# Altium schematic symbol library Altium_Library.SchLib: 822 symbols (part 14 of 17)
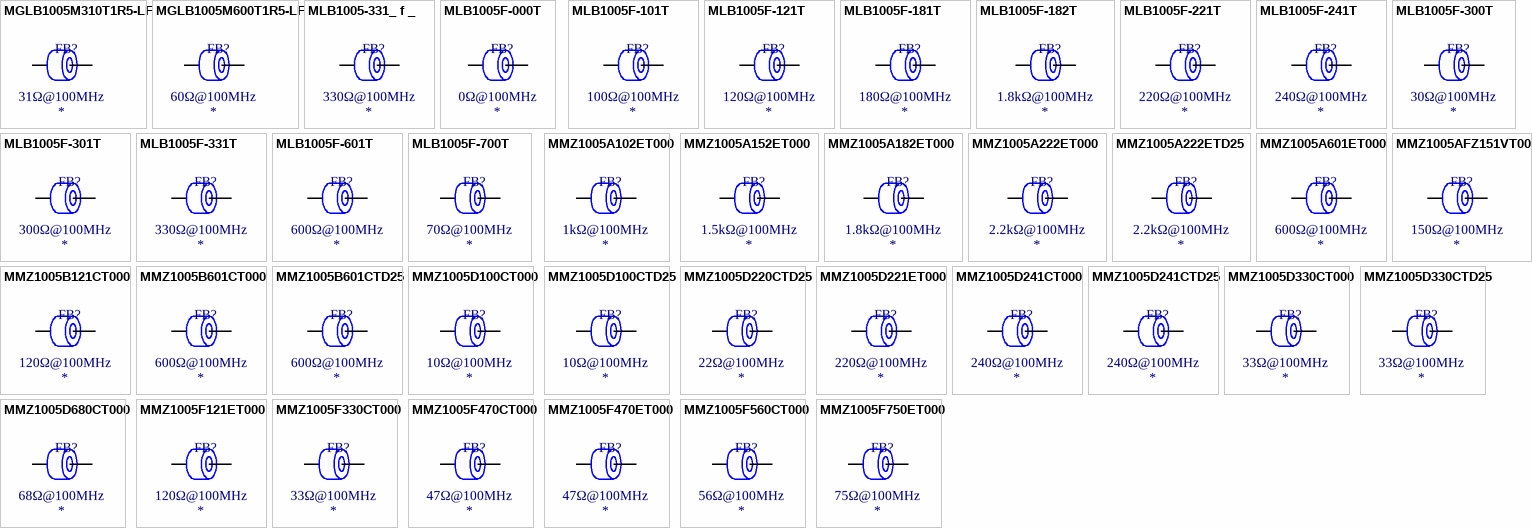
[diagram p33: symbols MGLB1005M310T1R5-LF to MMZ1005F750ET000]

## MLB1005F-181T
designator FB?  Impedance @ Frequency: 180Ω@100MHz
Ferrite, 180Ω@100MHz, ±25%, SMD 0402; Manufacturer: Meled; Manufacturer Part Number: MLB1005F-181T; Package Size: 0402; JLCPCB Basic Part: No; JLCPCB Part Number: C2844536; Supplier 1: LCSC; Category: Ferrite Beads; Supplier Part Number 1: C2844536; Tolerance: ±25%; RoHS: Yes; ComponentLink1Description: Datasheet; ComponentLink1URL: https://wmsc.lcsc.com/wmsc/upload/file/pdf/v2/lcsc/2306021142_MetalLions-MLB1005F-181T_C2844536.pdf; ComponentLink2Description: JLCPCB Part URL; ComponentLink2URL: https://jlcpcb.com/partdetail/C2844536; ComponentLink3Description: LCSC Part URL; ComponentLink3URL: https://lcsc.com/product-detail/Ferrite-Beads_MetalLions-MetalLions-MLB1005F-181T_C2844536.html
footprint FB-0402 (0402 (1005M) Ferrite)
pins: 1, 2

## MLB1005F-182T
designator FB?  Impedance @ Frequency: 1.8kΩ@100MHz
Ferrite, 1.8kΩ@100MHz, ±25%, 1.8Ω, 100mA, SMD 0402; Manufacturer: Meled; Manufacturer Part Number: MLB1005F-182T; Package Size: 0402; JLCPCB Basic Part: No; JLCPCB Part Number: C2844548; Supplier 1: LCSC; Category: Ferrite Beads; Supplier Part Number 1: C2844548; Tolerance: ±25%; Rated Current: 100mA; DC Resistance: 1.8Ω; RoHS: Yes; ComponentLink1Description: Datasheet; ComponentLink1URL: https://wmsc.lcsc.com/wmsc/upload/file/pdf/v2/lcsc/2306021142_MetalLions-MLB1005F-182T_C2844548.pdf; ComponentLink2Description: JLCPCB Part URL; ComponentLink2URL: https://jlcpcb.com/partdetail/C2844548; ComponentLink3Description: LCSC Part URL; ComponentLink3URL: https://lcsc.com/product-detail/Ferrite-Beads_MetalLions-MetalLions-MLB1005F-182T_C2844548.html
footprint FB-0402 (0402 (1005M) Ferrite)
pins: 1, 2

## MLB1005F-221T
designator FB?  Impedance @ Frequency: 220Ω@100MHz
Ferrite, 220Ω@100MHz, ±25%, 450mΩ, 150mA, SMD 0402; Manufacturer: Meled; Manufacturer Part Number: MLB1005F-221T; Package Size: 0402; JLCPCB Basic Part: No; JLCPCB Part Number: C2844537; Supplier 1: LCSC; Category: Ferrite Beads; Supplier Part Number 1: C2844537; Tolerance: ±25%; Rated Current: 150mA; DC Resistance: 450mΩ; RoHS: Yes; ComponentLink1Description: Datasheet; ComponentLink1URL: https://wmsc.lcsc.com/wmsc/upload/file/pdf/v2/lcsc/2306021142_MetalLions-MLB1005F-221T_C2844537.pdf; ComponentLink2Description: JLCPCB Part URL; ComponentLink2URL: https://jlcpcb.com/partdetail/C2844537; ComponentLink3Description: LCSC Part URL; ComponentLink3URL: https://lcsc.com/product-detail/Ferrite-Beads_MetalLions-MetalLions-MLB1005F-221T_C2844537.html
footprint FB-0402 (0402 (1005M) Ferrite)
pins: 1, 2

## MLB1005F-241T
designator FB?  Impedance @ Frequency: 240Ω@100MHz
Ferrite, 240Ω@100MHz, ±25%, 500mΩ, 200mA, SMD 0402; Manufacturer: Meled; Manufacturer Part Number: MLB1005F-241T; Package Size: 0402; JLCPCB Basic Part: No; JLCPCB Part Number: C2844538; Supplier 1: LCSC; Category: Ferrite Beads; Supplier Part Number 1: C2844538; Tolerance: ±25%; Rated Current: 200mA; DC Resistance: 500mΩ; RoHS: Yes; ComponentLink1Description: Datasheet; ComponentLink1URL: https://wmsc.lcsc.com/wmsc/upload/file/pdf/v2/lcsc/2306021142_MetalLions-MLB1005F-241T_C2844538.pdf; ComponentLink2Description: JLCPCB Part URL; ComponentLink2URL: https://jlcpcb.com/partdetail/C2844538; ComponentLink3Description: LCSC Part URL; ComponentLink3URL: https://lcsc.com/product-detail/Ferrite-Beads_MetalLions-MetalLions-MLB1005F-241T_C2844538.html
footprint FB-0402 (0402 (1005M) Ferrite)
pins: 1, 2

## MLB1005F-300T
designator FB?  Impedance @ Frequency: 30Ω@100MHz
Ferrite, 30Ω@100MHz, ±25%, 200mΩ, 300mA, SMD 0402; Manufacturer: Meled; Manufacturer Part Number: MLB1005F-300T; Package Size: 0402; JLCPCB Basic Part: No; JLCPCB Part Number: C2844528; Supplier 1: LCSC; Category: Ferrite Beads; Supplier Part Number 1: C2844528; Tolerance: ±25%; Rated Current: 300mA; DC Resistance: 200mΩ; RoHS: Yes; ComponentLink1Description: Datasheet; ComponentLink1URL: https://wmsc.lcsc.com/wmsc/upload/file/pdf/v2/lcsc/2306021141_MetalLions-MLB1005F-300T_C2844528.pdf; ComponentLink2Description: JLCPCB Part URL; ComponentLink2URL: https://jlcpcb.com/partdetail/C2844528; ComponentLink3Description: LCSC Part URL; ComponentLink3URL: https://lcsc.com/product-detail/Ferrite-Beads_MetalLions-MetalLions-MLB1005F-300T_C2844528.html
footprint FB-0402 (0402 (1005M) Ferrite)
pins: 1, 2

## MLB1005F-301T
designator FB?  Impedance @ Frequency: 300Ω@100MHz
Ferrite, 300Ω@100MHz, ±25%, 500mΩ, 100mA, SMD 0402; Manufacturer: Meled; Manufacturer Part Number: MLB1005F-301T; Package Size: 0402; JLCPCB Basic Part: No; JLCPCB Part Number: C2844539; Supplier 1: LCSC; Category: Ferrite Beads; Supplier Part Number 1: C2844539; Tolerance: ±25%; Rated Current: 100mA; DC Resistance: 500mΩ; RoHS: Yes; ComponentLink1Description: Datasheet; ComponentLink1URL: https://wmsc.lcsc.com/wmsc/upload/file/pdf/v2/lcsc/2306021142_MetalLions-MLB1005F-301T_C2844539.pdf; ComponentLink2Description: JLCPCB Part URL; ComponentLink2URL: https://jlcpcb.com/partdetail/C2844539; ComponentLink3Description: LCSC Part URL; ComponentLink3URL: https://lcsc.com/product-detail/Ferrite-Beads_MetalLions-MetalLions-MLB1005F-301T_C2844539.html
footprint FB-0402 (0402 (1005M) Ferrite)
pins: 1, 2

## MLB1005F-331T
designator FB?  Impedance @ Frequency: 330Ω@100MHz
Ferrite, 330Ω@100MHz, ±25%, SMD 0402; Manufacturer: Meled; Manufacturer Part Number: MLB1005F-331T; Package Size: 0402; JLCPCB Basic Part: No; JLCPCB Part Number: C2844540; Supplier 1: LCSC; Category: Ferrite Beads; Supplier Part Number 1: C2844540; Tolerance: ±25%; RoHS: Yes; ComponentLink1Description: Datasheet; ComponentLink1URL: https://wmsc.lcsc.com/wmsc/upload/file/pdf/v2/lcsc/2306021142_MetalLions-MLB1005F-331T_C2844540.pdf; ComponentLink2Description: JLCPCB Part URL; ComponentLink2URL: https://jlcpcb.com/partdetail/C2844540; ComponentLink3Description: LCSC Part URL; ComponentLink3URL: https://lcsc.com/product-detail/Ferrite-Beads_MetalLions-MetalLions-MLB1005F-331T_C2844540.html
footprint FB-0402 (0402 (1005M) Ferrite)
pins: 1, 2

## MLB1005F-601T
designator FB?  Impedance @ Frequency: 600Ω@100MHz
Ferrite, 600Ω@100MHz, ±25%, 0.9Ω, 100mA, SMD 0402; Manufacturer: Meled; Manufacturer Part Number: MLB1005F-601T; Package Size: 0402; JLCPCB Basic Part: No; JLCPCB Part Number: C2844543; Supplier 1: LCSC; Category: Ferrite Beads; Supplier Part Number 1: C2844543; Tolerance: ±25%; Rated Current: 100mA; DC Resistance: 0.9Ω; RoHS: Yes; ComponentLink1Description: Datasheet; ComponentLink1URL: https://wmsc.lcsc.com/wmsc/upload/file/pdf/v2/lcsc/2306021142_MetalLions-MLB1005F-601T_C2844543.pdf; ComponentLink2Description: JLCPCB Part URL; ComponentLink2URL: https://jlcpcb.com/partdetail/C2844543; ComponentLink3Description: LCSC Part URL; ComponentLink3URL: https://lcsc.com/product-detail/Ferrite-Beads_Meled-Meled-MLB1005F-601T_C2844543.html
footprint FB-0402 (0402 (1005M) Ferrite)
pins: 1, 2

## MLB1005F-700T
designator FB?  Impedance @ Frequency: 70Ω@100MHz
Ferrite, 70Ω@100MHz, ±25%, 300mΩ, 200mA, SMD 0402; Manufacturer: Meled; Manufacturer Part Number: MLB1005F-700T; Package Size: 0402; JLCPCB Basic Part: No; JLCPCB Part Number: C2844532; Supplier 1: LCSC; Category: Ferrite Beads; Supplier Part Number 1: C2844532; Tolerance: ±25%; Rated Current: 200mA; DC Resistance: 300mΩ; RoHS: Yes; ComponentLink1Description: Datasheet; ComponentLink1URL: https://wmsc.lcsc.com/wmsc/upload/file/pdf/v2/lcsc/2306021141_MetalLions-MLB1005F-700T_C2844532.pdf; ComponentLink2Description: JLCPCB Part URL; ComponentLink2URL: https://jlcpcb.com/partdetail/C2844532; ComponentLink3Description: LCSC Part URL; ComponentLink3URL: https://lcsc.com/product-detail/Ferrite-Beads_MetalLions-MetalLions-MLB1005F-700T_C2844532.html
footprint FB-0402 (0402 (1005M) Ferrite)
pins: 1, 2

## MMZ1005A102ET000
designator FB?  Impedance @ Frequency: 1kΩ@100MHz
Ferrite, 1kΩ@100MHz, ±25%, 1.2Ω, 250mA, SMD 0402; Manufacturer: TDK; Manufacturer Part Number: MMZ1005A102ET000; Package Size: 0402; JLCPCB Basic Part: No; JLCPCB Part Number: C275408; Supplier 1: LCSC; Category: Ferrite Beads; Supplier Part Number 1: C275408; Tolerance: ±25%; Rated Current: 250mA; DC Resistance: 1.2Ω; RoHS: Yes; ComponentLink1Description: Datasheet; ComponentLink1URL: https://wmsc.lcsc.com/wmsc/upload/file/pdf/v2/lcsc/2304140030_TDK-MMZ1005A102ET000_C275408.pdf; ComponentLink2Description: JLCPCB Part URL; ComponentLink2URL: https://jlcpcb.com/partdetail/C275408; ComponentLink3Description: LCSC Part URL; ComponentLink3URL: https://lcsc.com/product-detail/Ferrite-Beads_TDK-TDK-MMZ1005A102ET000_C275408.html
footprint FB-0402 (0402 (1005M) Ferrite)
pins: 1, 2

## MMZ1005A152ET000
designator FB?  Impedance @ Frequency: 1.5kΩ@100MHz
Ferrite, 1.5kΩ@100MHz, ±25%, 1.6Ω, 230mA, SMD 0402; Manufacturer: TDK; Manufacturer Part Number: MMZ1005A152ET000; Package Size: 0402; JLCPCB Basic Part: No; JLCPCB Part Number: C76802; Supplier 1: LCSC; Category: Ferrite Beads; Supplier Part Number 1: C76802; Tolerance: ±25%; Rated Current: 230mA; DC Resistance: 1.6Ω; RoHS: Yes; ComponentLink1Description: Datasheet; ComponentLink1URL: https://wmsc.lcsc.com/wmsc/upload/file/pdf/v2/lcsc/2304140030_TDK-MMZ1005A152ET000_C76802.pdf; ComponentLink2Description: JLCPCB Part URL; ComponentLink2URL: https://jlcpcb.com/partdetail/C76802; ComponentLink3Description: LCSC Part URL; ComponentLink3URL: https://lcsc.com/product-detail/Ferrite-Beads_TDK-TDK-MMZ1005A152ET000_C76802.html
footprint FB-0402 (0402 (1005M) Ferrite)
pins: 1, 2

## MMZ1005A182ET000
designator FB?  Impedance @ Frequency: 1.8kΩ@100MHz
Ferrite, 1.8kΩ@100MHz, ±25%, 2.1Ω, 200mA, SMD 0402; Manufacturer: TDK; Manufacturer Part Number: MMZ1005A182ET000; Package Size: 0402; JLCPCB Basic Part: No; JLCPCB Part Number: C250446; Supplier 1: LCSC; Category: Ferrite Beads; Supplier Part Number 1: C250446; Tolerance: ±25%; Rated Current: 200mA; DC Resistance: 2.1Ω; RoHS: Yes; ComponentLink1Description: Datasheet; ComponentLink1URL: https://wmsc.lcsc.com/wmsc/upload/file/pdf/v2/lcsc/1810262207_TDK-MMZ1005A182ET000_C250446.pdf; ComponentLink2Description: JLCPCB Part URL; ComponentLink2URL: https://jlcpcb.com/partdetail/C250446; ComponentLink3Description: LCSC Part URL; ComponentLink3URL: https://lcsc.com/product-detail/Ferrite-Beads_TDK-TDK-MMZ1005A182ET000_C250446.html
footprint FB-0402 (0402 (1005M) Ferrite)
pins: 1, 2

## MMZ1005A222ET000
designator FB?  Impedance @ Frequency: 2.2kΩ@100MHz
Ferrite, 2.2kΩ@100MHz, ±25%, 2.2Ω, 150mA, SMD 0402; Manufacturer: TDK; Manufacturer Part Number: MMZ1005A222ET000; Package Size: 0402; JLCPCB Basic Part: No; JLCPCB Part Number: C275411; Supplier 1: LCSC; Category: Ferrite Beads; Supplier Part Number 1: C275411; Tolerance: ±25%; Rated Current: 150mA; DC Resistance: 2.2Ω; RoHS: Yes; ComponentLink1Description: Datasheet; ComponentLink1URL: https://wmsc.lcsc.com/wmsc/upload/file/pdf/v2/lcsc/2304140030_TDK-MMZ1005A222ET000_C275411.pdf; ComponentLink2Description: JLCPCB Part URL; ComponentLink2URL: https://jlcpcb.com/partdetail/C275411; ComponentLink3Description: LCSC Part URL; ComponentLink3URL: https://lcsc.com/product-detail/Ferrite-Beads_TDK-TDK-MMZ1005A222ET000_C275411.html
footprint FB-0402 (0402 (1005M) Ferrite)
pins: 1, 2

## MMZ1005A222ETD25
designator FB?  Impedance @ Frequency: 2.2kΩ@100MHz
Ferrite, 2.2kΩ@100MHz, ±25%, 2.2Ω, 150mA, SMD 0402; Manufacturer: TDK; Manufacturer Part Number: MMZ1005A222ETD25; Package Size: 0402; JLCPCB Basic Part: No; JLCPCB Part Number: C2661556; Supplier 1: LCSC; Category: Ferrite Beads; Supplier Part Number 1: C2661556; Tolerance: ±25%; Rated Current: 150mA; DC Resistance: 2.2Ω; RoHS: Yes; ComponentLink1Description: Datasheet; ComponentLink1URL: https://wmsc.lcsc.com/wmsc/upload/file/pdf/v2/lcsc/2304140030_TDK-MMZ1005A222ETD25_C2661556.pdf; ComponentLink2Description: JLCPCB Part URL; ComponentLink2URL: https://jlcpcb.com/partdetail/C2661556; ComponentLink3Description: LCSC Part URL; ComponentLink3URL: https://lcsc.com/product-detail/Ferrite-Beads_TDK-TDK-MMZ1005A222ETD25_C2661556.html
footprint FB-0402 (0402 (1005M) Ferrite)
pins: 1, 2

## MMZ1005A601ET000
designator FB?  Impedance @ Frequency: 600Ω@100MHz
Ferrite, 600Ω@100MHz, ±25%, 800mΩ, 300mA, SMD 0402; Manufacturer: TDK; Manufacturer Part Number: MMZ1005A601ET000; Package Size: 0402; JLCPCB Basic Part: No; JLCPCB Part Number: C275412; Supplier 1: LCSC; Category: Ferrite Beads; Supplier Part Number 1: C275412; Tolerance: ±25%; Rated Current: 300mA; DC Resistance: 800mΩ; RoHS: Yes; ComponentLink1Description: Datasheet; ComponentLink1URL: https://wmsc.lcsc.com/wmsc/upload/file/pdf/v2/lcsc/2005181102_TDK-MMZ1005A601ET000_C275412.pdf; ComponentLink2Description: JLCPCB Part URL; ComponentLink2URL: https://jlcpcb.com/partdetail/C275412; ComponentLink3Description: LCSC Part URL; ComponentLink3URL: https://lcsc.com/product-detail/Ferrite-Beads_TDK-TDK-MMZ1005A601ET000_C275412.html
footprint FB-0402 (0402 (1005M) Ferrite)
pins: 1, 2

## MMZ1005AFZ151VT000
designator FB?  Impedance @ Frequency: 150Ω@100MHz
Ferrite, 150Ω@100MHz, ±25%, 1.3Ω, 200mA, SMD 0402; Manufacturer: TDK; Manufacturer Part Number: MMZ1005AFZ151VT000; Package Size: 0402; JLCPCB Basic Part: No; JLCPCB Part Number: C307756; Supplier 1: LCSC; Category: Ferrite Beads; Supplier Part Number 1: C307756; Tolerance: ±25%; Rated Current: 200mA; DC Resistance: 1.3Ω; RoHS: Yes; ComponentLink1Description: Datasheet; ComponentLink1URL: https://wmsc.lcsc.com/wmsc/upload/file/pdf/v2/lcsc/1811021517_TDK-MMZ1005AFZ151VT000_C307756.pdf; ComponentLink2Description: JLCPCB Part URL; ComponentLink2URL: https://jlcpcb.com/partdetail/C307756; ComponentLink3Description: LCSC Part URL; ComponentLink3URL: https://lcsc.com/product-detail/Ferrite-Beads_TDK-TDK-MMZ1005AFZ151VT000_C307756.html
footprint FB-0402 (0402 (1005M) Ferrite)
pins: 1, 2

## MMZ1005B121CT000
designator FB?  Impedance @ Frequency: 120Ω@100MHz
Ferrite, 120Ω@100MHz, ±25%, 250mΩ, 400mA, SMD 0402; Manufacturer: TDK; Manufacturer Part Number: MMZ1005B121CT000; Package Size: 0402; JLCPCB Basic Part: No; JLCPCB Part Number: C307757; Supplier 1: LCSC; Category: Ferrite Beads; Supplier Part Number 1: C307757; Tolerance: ±25%; Rated Current: 400mA; DC Resistance: 250mΩ; RoHS: Yes; ComponentLink1Description: Datasheet; ComponentLink1URL: https://wmsc.lcsc.com/wmsc/upload/file/pdf/v2/lcsc/1811030912_TDK-MMZ1005B121CT000_C307757.pdf; ComponentLink2Description: JLCPCB Part URL; ComponentLink2URL: https://jlcpcb.com/partdetail/C307757; ComponentLink3Description: LCSC Part URL; ComponentLink3URL: https://lcsc.com/product-detail/Ferrite-Beads_TDK-TDK-MMZ1005B121CT000_C307757.html
footprint FB-0402 (0402 (1005M) Ferrite)
pins: 1, 2

## MMZ1005B601CT000
designator FB?  Impedance @ Frequency: 600Ω@100MHz
Ferrite, 600Ω@100MHz, ±25%, 850mΩ, 200mA, SMD 0402; Manufacturer: TDK; Manufacturer Part Number: MMZ1005B601CT000; Package Size: 0402; JLCPCB Basic Part: No; JLCPCB Part Number: C275413; Supplier 1: LCSC; Category: Ferrite Beads; Supplier Part Number 1: C275413; Tolerance: ±25%; Rated Current: 200mA; DC Resistance: 850mΩ; RoHS: Yes; ComponentLink1Description: Datasheet; ComponentLink1URL: https://wmsc.lcsc.com/wmsc/upload/file/pdf/v2/lcsc/2304140030_TDK-MMZ1005B601CT000_C275413.pdf; ComponentLink2Description: JLCPCB Part URL; ComponentLink2URL: https://jlcpcb.com/partdetail/C275413; ComponentLink3Description: LCSC Part URL; ComponentLink3URL: https://lcsc.com/product-detail/Ferrite-Beads_TDK-TDK-MMZ1005B601CT000_C275413.html
footprint FB-0402 (0402 (1005M) Ferrite)
pins: 1, 2

## MMZ1005B601CTD25
designator FB?  Impedance @ Frequency: 600Ω@100MHz
Ferrite, 600Ω@100MHz, ±25%, 850mΩ, 200mA, SMD 0402; Manufacturer: TDK; Manufacturer Part Number: MMZ1005B601CTD25; Package Size: 0402; JLCPCB Basic Part: No; JLCPCB Part Number: C404691; Supplier 1: LCSC; Category: Ferrite Beads; Supplier Part Number 1: C404691; Tolerance: ±25%; Rated Current: 200mA; DC Resistance: 850mΩ; RoHS: Yes; ComponentLink1Description: Datasheet; ComponentLink1URL: https://wmsc.lcsc.com/wmsc/upload/file/pdf/v2/lcsc/2304140030_TDK-MMZ1005B601CTD25_C404691.pdf; ComponentLink2Description: JLCPCB Part URL; ComponentLink2URL: https://jlcpcb.com/partdetail/C404691; ComponentLink3Description: LCSC Part URL; ComponentLink3URL: https://lcsc.com/product-detail/Ferrite-Beads_TDK-TDK-MMZ1005B601CTD25_C404691.html
footprint FB-0402 (0402 (1005M) Ferrite)
pins: 1, 2

## MMZ1005D100CT000
designator FB?  Impedance @ Frequency: 10Ω@100MHz
Ferrite, 10Ω@100MHz, ±25%, 100mΩ, 500mA, SMD 0402; Manufacturer: TDK; Manufacturer Part Number: MMZ1005D100CT000; Package Size: 0402; JLCPCB Basic Part: No; JLCPCB Part Number: C531292; Supplier 1: LCSC; Category: Ferrite Beads; Supplier Part Number 1: C531292; Tolerance: ±25%; Rated Current: 500mA; DC Resistance: 100mΩ; RoHS: Yes; ComponentLink1Description: Datasheet; ComponentLink1URL: https://wmsc.lcsc.com/wmsc/upload/file/pdf/v2/lcsc/2006191008_TDK-MMZ1005D100CT000_C531292.pdf; ComponentLink2Description: JLCPCB Part URL; ComponentLink2URL: https://jlcpcb.com/partdetail/C531292; ComponentLink3Description: LCSC Part URL; ComponentLink3URL: https://lcsc.com/product-detail/Ferrite-Beads_TDK-TDK-MMZ1005D100CT000_C531292.html
footprint FB-0402 (0402 (1005M) Ferrite)
pins: 1, 2

## MMZ1005D100CTD25
designator FB?  Impedance @ Frequency: 10Ω@100MHz
Ferrite, 10Ω@100MHz, ±25%, 100mΩ, 500mA, SMD 0402; Manufacturer: TDK; Manufacturer Part Number: MMZ1005D100CTD25; Package Size: 0402; JLCPCB Basic Part: No; JLCPCB Part Number: C404705; Supplier 1: LCSC; Category: Ferrite Beads; Supplier Part Number 1: C404705; Tolerance: ±25%; Rated Current: 500mA; DC Resistance: 100mΩ; RoHS: Yes; ComponentLink1Description: Datasheet; ComponentLink1URL: https://wmsc.lcsc.com/wmsc/upload/file/pdf/v2/lcsc/2304140030_TDK-MMZ1005D100CTD25_C404705.pdf; ComponentLink2Description: JLCPCB Part URL; ComponentLink2URL: https://jlcpcb.com/partdetail/C404705; ComponentLink3Description: LCSC Part URL; ComponentLink3URL: https://lcsc.com/product-detail/Ferrite-Beads_TDK-TDK-MMZ1005D100CTD25_C404705.html
footprint FB-0402 (0402 (1005M) Ferrite)
pins: 1, 2

## MMZ1005D220CTD25
designator FB?  Impedance @ Frequency: 22Ω@100MHz
Ferrite, 22Ω@100MHz, ±25%, 170mΩ, 400mA, SMD 0402; Manufacturer: TDK; Manufacturer Part Number: MMZ1005D220CTD25; Package Size: 0402; JLCPCB Basic Part: No; JLCPCB Part Number: C404706; Supplier 1: LCSC; Category: Ferrite Beads; Supplier Part Number 1: C404706; Tolerance: ±25%; Rated Current: 400mA; DC Resistance: 170mΩ; RoHS: Yes; ComponentLink1Description: Datasheet; ComponentLink1URL: https://wmsc.lcsc.com/wmsc/upload/file/pdf/v2/lcsc/2304140030_TDK-MMZ1005D220CTD25_C404706.pdf; ComponentLink2Description: JLCPCB Part URL; ComponentLink2URL: https://jlcpcb.com/partdetail/C404706; ComponentLink3Description: LCSC Part URL; ComponentLink3URL: https://lcsc.com/product-detail/Ferrite-Beads_TDK-TDK-MMZ1005D220CTD25_C404706.html
footprint FB-0402 (0402 (1005M) Ferrite)
pins: 1, 2

## MMZ1005D221ET000
designator FB?  Impedance @ Frequency: 220Ω@100MHz
Ferrite, 220Ω@100MHz, ±25%, 1Ω, 250mA, SMD 0402; Manufacturer: TDK; Manufacturer Part Number: MMZ1005D221ET000; Package Size: 0402; JLCPCB Basic Part: No; JLCPCB Part Number: C275415; Supplier 1: LCSC; Category: Ferrite Beads; Supplier Part Number 1: C275415; Tolerance: ±25%; Rated Current: 250mA; DC Resistance: 1Ω; RoHS: Yes; ComponentLink1Description: Datasheet; ComponentLink1URL: https://wmsc.lcsc.com/wmsc/upload/file/pdf/v2/lcsc/2304140030_TDK-MMZ1005D221ET000_C275415.pdf; ComponentLink2Description: JLCPCB Part URL; ComponentLink2URL: https://jlcpcb.com/partdetail/C275415; ComponentLink3Description: LCSC Part URL; ComponentLink3URL: https://lcsc.com/product-detail/Ferrite-Beads_TDK-TDK-MMZ1005D221ET000_C275415.html
footprint FB-0402 (0402 (1005M) Ferrite)
pins: 1, 2

## MMZ1005D241CT000
designator FB?  Impedance @ Frequency: 240Ω@100MHz
Ferrite, 240Ω@100MHz, ±25%, 900mΩ, 200mA, SMD 0402; Manufacturer: TDK; Manufacturer Part Number: MMZ1005D241CT000; Package Size: 0402; JLCPCB Basic Part: No; JLCPCB Part Number: C524456; Supplier 1: LCSC; Category: Ferrite Beads; Supplier Part Number 1: C524456; Tolerance: ±25%; Rated Current: 200mA; DC Resistance: 900mΩ; RoHS: Yes; ComponentLink1Description: Datasheet; ComponentLink1URL: https://wmsc.lcsc.com/wmsc/upload/file/pdf/v2/lcsc/2304140030_TDK-MMZ1005D241CT000_C524456.pdf; ComponentLink2Description: JLCPCB Part URL; ComponentLink2URL: https://jlcpcb.com/partdetail/C524456; ComponentLink3Description: LCSC Part URL; ComponentLink3URL: https://lcsc.com/product-detail/Ferrite-Beads_TDK-TDK-MMZ1005D241CT000_C524456.html
footprint FB-0402 (0402 (1005M) Ferrite)
pins: 1, 2

## MMZ1005D241CTD25
designator FB?  Impedance @ Frequency: 240Ω@100MHz
Ferrite, 240Ω@100MHz, ±25%, 900mΩ, 200mA, SMD 0402; Manufacturer: TDK; Manufacturer Part Number: MMZ1005D241CTD25; Package Size: 0402; JLCPCB Basic Part: No; JLCPCB Part Number: C404710; Supplier 1: LCSC; Category: Ferrite Beads; Supplier Part Number 1: C404710; Tolerance: ±25%; Rated Current: 200mA; DC Resistance: 900mΩ; RoHS: Yes; ComponentLink1Description: Datasheet; ComponentLink1URL: https://wmsc.lcsc.com/wmsc/upload/file/pdf/v2/lcsc/2304140030_TDK-MMZ1005D241CTD25_C404710.pdf; ComponentLink2Description: JLCPCB Part URL; ComponentLink2URL: https://jlcpcb.com/partdetail/C404710; ComponentLink3Description: LCSC Part URL; ComponentLink3URL: https://lcsc.com/product-detail/Ferrite-Beads_TDK-TDK-MMZ1005D241CTD25_C404710.html
footprint FB-0402 (0402 (1005M) Ferrite)
pins: 1, 2

## MMZ1005D330CT000
designator FB?  Impedance @ Frequency: 33Ω@100MHz
Ferrite, 33Ω@100MHz, ±25%, 0.24Ω, 0.4A, SMD 0402; Manufacturer: TDK; Manufacturer Part Number: MMZ1005D330CT000; Package Size: 0402; JLCPCB Basic Part: No; JLCPCB Part Number: C2833717; Supplier 1: LCSC; Category: Ferrite Beads; Supplier Part Number 1: C2833717; Tolerance: ±25%; Rated Current: 0.4A; DC Resistance: 0.24Ω; RoHS: Yes; ComponentLink1Description: Datasheet; ComponentLink1URL: https://wmsc.lcsc.com/wmsc/upload/file/pdf/v2/lcsc/2111030930_TDK-MMZ1005D330CT000_C2833717.pdf; ComponentLink2Description: JLCPCB Part URL; ComponentLink2URL: https://jlcpcb.com/partdetail/C2833717; ComponentLink3Description: LCSC Part URL; ComponentLink3URL: https://lcsc.com/product-detail/Ferrite-Beads_TDK-TDK-MMZ1005D330CT000_C2833717.html
footprint FB-0402 (0402 (1005M) Ferrite)
pins: 1, 2

## MMZ1005D330CTD25
designator FB?  Impedance @ Frequency: 33Ω@100MHz
Ferrite, 33Ω@100MHz, ±25%, 240mΩ, 400mA, SMD 0402; Manufacturer: TDK; Manufacturer Part Number: MMZ1005D330CTD25; Package Size: 0402; JLCPCB Basic Part: No; JLCPCB Part Number: C404707; Supplier 1: LCSC; Category: Ferrite Beads; Supplier Part Number 1: C404707; Tolerance: ±25%; Rated Current: 400mA; DC Resistance: 240mΩ; RoHS: Yes; ComponentLink1Description: Datasheet; ComponentLink1URL: https://wmsc.lcsc.com/wmsc/upload/file/pdf/v2/lcsc/2304140030_TDK-MMZ1005D330CTD25_C404707.pdf; ComponentLink2Description: JLCPCB Part URL; ComponentLink2URL: https://jlcpcb.com/partdetail/C404707; ComponentLink3Description: LCSC Part URL; ComponentLink3URL: https://lcsc.com/product-detail/Ferrite-Beads_TDK-TDK-MMZ1005D330CTD25_C404707.html
footprint FB-0402 (0402 (1005M) Ferrite)
pins: 1, 2

## MMZ1005D680CT000
designator FB?  Impedance @ Frequency: 68Ω@100MHz
Ferrite, 68Ω@100MHz, ±25%, 380mΩ, 400mA, SMD 0402; Manufacturer: TDK; Manufacturer Part Number: MMZ1005D680CT000; Package Size: 0402; JLCPCB Basic Part: No; JLCPCB Part Number: C275416; Supplier 1: LCSC; Category: Ferrite Beads; Supplier Part Number 1: C275416; Tolerance: ±25%; Rated Current: 400mA; DC Resistance: 380mΩ; RoHS: Yes; ComponentLink1Description: Datasheet; ComponentLink1URL: https://wmsc.lcsc.com/wmsc/upload/file/pdf/v2/lcsc/2304140030_TDK-MMZ1005D680CT000_C275416.pdf; ComponentLink2Description: JLCPCB Part URL; ComponentLink2URL: https://jlcpcb.com/partdetail/C275416; ComponentLink3Description: LCSC Part URL; ComponentLink3URL: https://lcsc.com/product-detail/Ferrite-Beads_TDK-TDK-MMZ1005D680CT000_C275416.html
footprint FB-0402 (0402 (1005M) Ferrite)
pins: 1, 2

## MMZ1005F121ET000
designator FB?  Impedance @ Frequency: 120Ω@100MHz
Ferrite, 120Ω@100MHz, ±25%, 1.5Ω, 200mA, SMD 0402; Manufacturer: TDK; Manufacturer Part Number: MMZ1005F121ET000; Package Size: 0402; JLCPCB Basic Part: No; JLCPCB Part Number: C89458; Supplier 1: LCSC; Category: Ferrite Beads; Supplier Part Number 1: C89458; Tolerance: ±25%; Rated Current: 200mA; DC Resistance: 1.5Ω; RoHS: Yes; ComponentLink1Description: Datasheet; ComponentLink1URL: https://wmsc.lcsc.com/wmsc/upload/file/pdf/v2/lcsc/1809051316_TDK-MMZ1005F121ET000_C89458.pdf; ComponentLink2Description: JLCPCB Part URL; ComponentLink2URL: https://jlcpcb.com/partdetail/C89458; ComponentLink3Description: LCSC Part URL; ComponentLink3URL: https://lcsc.com/product-detail/Ferrite-Beads_TDK-TDK-MMZ1005F121ET000_C89458.html
footprint FB-0402 (0402 (1005M) Ferrite)
pins: 1, 2

## MMZ1005F330CT000
designator FB?  Impedance @ Frequency: 33Ω@100MHz
Ferrite, 33Ω@100MHz, ±25%, 500mΩ, 200mA, SMD 0402; Manufacturer: TDK; Manufacturer Part Number: MMZ1005F330CT000; Package Size: 0402; JLCPCB Basic Part: No; JLCPCB Part Number: C275418; Supplier 1: LCSC; Category: Ferrite Beads; Supplier Part Number 1: C275418; Tolerance: ±25%; Rated Current: 200mA; DC Resistance: 500mΩ; RoHS: Yes; ComponentLink1Description: Datasheet; ComponentLink1URL: https://wmsc.lcsc.com/wmsc/upload/file/pdf/v2/lcsc/2304140030_TDK-MMZ1005F330CT000_C275418.pdf; ComponentLink2Description: JLCPCB Part URL; ComponentLink2URL: https://jlcpcb.com/partdetail/C275418; ComponentLink3Description: LCSC Part URL; ComponentLink3URL: https://lcsc.com/product-detail/Ferrite-Beads_TDK-TDK-MMZ1005F330CT000_C275418.html
footprint FB-0402 (0402 (1005M) Ferrite)
pins: 1, 2

## MMZ1005F470CT000
designator FB?  Impedance @ Frequency: 47Ω@100MHz
Ferrite, 47Ω@100MHz, ±25%, 600mΩ, 100mA, SMD 0402; Manufacturer: TDK; Manufacturer Part Number: MMZ1005F470CT000; Package Size: 0402; JLCPCB Basic Part: No; JLCPCB Part Number: C275419; Supplier 1: LCSC; Category: Ferrite Beads; Supplier Part Number 1: C275419; Tolerance: ±25%; Rated Current: 100mA; DC Resistance: 600mΩ; RoHS: Yes; ComponentLink1Description: Datasheet; ComponentLink1URL: https://wmsc.lcsc.com/wmsc/upload/file/pdf/v2/lcsc/2304140030_TDK-MMZ1005F470CT000_C275419.pdf; ComponentLink2Description: JLCPCB Part URL; ComponentLink2URL: https://jlcpcb.com/partdetail/C275419; ComponentLink3Description: LCSC Part URL; ComponentLink3URL: https://lcsc.com/product-detail/Ferrite-Beads_TDK-TDK-MMZ1005F470CT000_C275419.html
footprint FB-0402 (0402 (1005M) Ferrite)
pins: 1, 2

## MMZ1005F470ET000
designator FB?  Impedance @ Frequency: 47Ω@100MHz
Ferrite, 47Ω@100MHz, ±25%, 700mΩ, 300mA, SMD 0402; Manufacturer: TDK; Manufacturer Part Number: MMZ1005F470ET000; Package Size: 0402; JLCPCB Basic Part: No; JLCPCB Part Number: C275420; Supplier 1: LCSC; Category: Ferrite Beads; Supplier Part Number 1: C275420; Tolerance: ±25%; Rated Current: 300mA; DC Resistance: 700mΩ; RoHS: Yes; ComponentLink1Description: Datasheet; ComponentLink1URL: https://wmsc.lcsc.com/wmsc/upload/file/pdf/v2/lcsc/2304140030_TDK-MMZ1005F470ET000_C275420.pdf; ComponentLink2Description: JLCPCB Part URL; ComponentLink2URL: https://jlcpcb.com/partdetail/C275420; ComponentLink3Description: LCSC Part URL; ComponentLink3URL: https://lcsc.com/product-detail/Ferrite-Beads_TDK-TDK-MMZ1005F470ET000_C275420.html
footprint FB-0402 (0402 (1005M) Ferrite)
pins: 1, 2

## MMZ1005F560CT000
designator FB?  Impedance @ Frequency: 56Ω@100MHz
Ferrite, 56Ω@100MHz, ±25%, 700mΩ, 100mA, SMD 0402; Manufacturer: TDK; Manufacturer Part Number: MMZ1005F560CT000; Package Size: 0402; JLCPCB Basic Part: No; JLCPCB Part Number: C275421; Supplier 1: LCSC; Category: Ferrite Beads; Supplier Part Number 1: C275421; Tolerance: ±25%; Rated Current: 100mA; DC Resistance: 700mΩ; RoHS: Yes; ComponentLink1Description: Datasheet; ComponentLink1URL: https://wmsc.lcsc.com/wmsc/upload/file/pdf/v2/lcsc/2304140030_TDK-MMZ1005F560CT000_C275421.pdf; ComponentLink2Description: JLCPCB Part URL; ComponentLink2URL: https://jlcpcb.com/partdetail/C275421; ComponentLink3Description: LCSC Part URL; ComponentLink3URL: https://lcsc.com/product-detail/Ferrite-Beads_TDK-TDK-MMZ1005F560CT000_C275421.html
footprint FB-0402 (0402 (1005M) Ferrite)
pins: 1, 2

## MMZ1005F750ET000
designator FB?  Impedance @ Frequency: 75Ω@100MHz
Ferrite, 75Ω@100MHz, ±25%, 1Ω, 250mA, SMD 0402; Manufacturer: TDK; Manufacturer Part Number: MMZ1005F750ET000; Package Size: 0402; JLCPCB Basic Part: No; JLCPCB Part Number: C275422; Supplier 1: LCSC; Category: Ferrite Beads; Supplier Part Number 1: C275422; Tolerance: ±25%; Rated Current: 250mA; DC Resistance: 1Ω; RoHS: Yes; ComponentLink1Description: Datasheet; ComponentLink1URL: https://wmsc.lcsc.com/wmsc/upload/file/pdf/v2/lcsc/2304140030_TDK-MMZ1005F750ET000_C275422.pdf; ComponentLink2Description: JLCPCB Part URL; ComponentLink2URL: https://jlcpcb.com/partdetail/C275422; ComponentLink3Description: LCSC Part URL; ComponentLink3URL: https://lcsc.com/product-detail/Ferrite-Beads_TDK-TDK-MMZ1005F750ET000_C275422.html
footprint FB-0402 (0402 (1005M) Ferrite)
pins: 1, 2

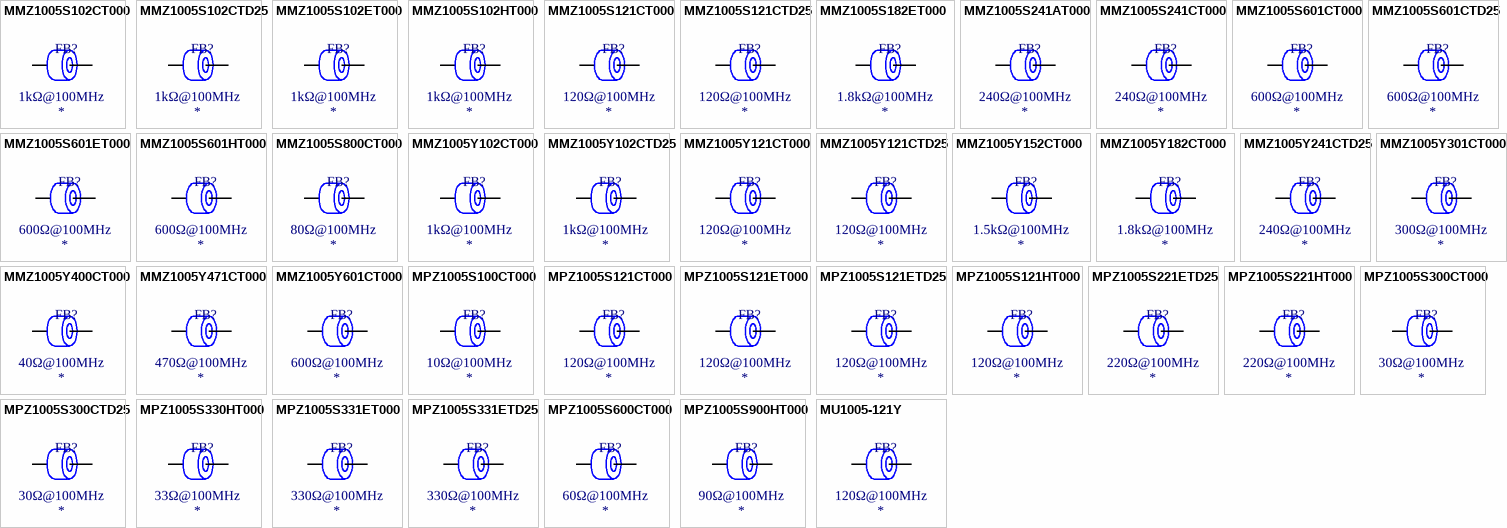
[diagram p17: symbols MMZ1005S102CT000 to MU1005-121Y]

## MMZ1005S102CT000
designator FB?  Impedance @ Frequency: 1kΩ@100MHz
Ferrite, 1kΩ@100MHz, ±25%, 750mΩ, 200mA, SMD 0402; Manufacturer: TDK; Manufacturer Part Number: MMZ1005S102CT000; Package Size: 0402; JLCPCB Basic Part: No; JLCPCB Part Number: C76803; Supplier 1: LCSC; Category: Ferrite Beads; Supplier Part Number 1: C76803; Tolerance: ±25%; Rated Current: 200mA; DC Resistance: 750mΩ; RoHS: Yes; ComponentLink1Description: Datasheet; ComponentLink1URL: https://wmsc.lcsc.com/wmsc/upload/file/pdf/v2/lcsc/2304140030_TDK-MMZ1005S102CT000_C76803.pdf; ComponentLink2Description: JLCPCB Part URL; ComponentLink2URL: https://jlcpcb.com/partdetail/C76803; ComponentLink3Description: LCSC Part URL; ComponentLink3URL: https://lcsc.com/product-detail/Ferrite-Beads_TDK-TDK-MMZ1005S102CT000_C76803.html
footprint FB-0402 (0402 (1005M) Ferrite)
pins: 1, 2

## MMZ1005S102CTD25
designator FB?  Impedance @ Frequency: 1kΩ@100MHz
Ferrite, 1kΩ@100MHz, ±25%, 750mΩ, 200mA, SMD 0402; Manufacturer: TDK; Manufacturer Part Number: MMZ1005S102CTD25; Package Size: 0402; JLCPCB Basic Part: No; JLCPCB Part Number: C360716; Supplier 1: LCSC; Category: Ferrite Beads; Supplier Part Number 1: C360716; Tolerance: ±25%; Rated Current: 200mA; DC Resistance: 750mΩ; RoHS: Yes; ComponentLink1Description: Datasheet; ComponentLink1URL: https://wmsc.lcsc.com/wmsc/upload/file/pdf/v2/lcsc/1912111437_TDK-MMZ1005S102CTD25_C360716.pdf; ComponentLink2Description: JLCPCB Part URL; ComponentLink2URL: https://jlcpcb.com/partdetail/C360716; ComponentLink3Description: LCSC Part URL; ComponentLink3URL: https://lcsc.com/product-detail/Ferrite-Beads_TDK-TDK-MMZ1005S102CTD25_C360716.html
footprint FB-0402 (0402 (1005M) Ferrite)
pins: 1, 2

## MMZ1005S102ET000
designator FB?  Impedance @ Frequency: 1kΩ@100MHz
Ferrite, 1kΩ@100MHz, ±25%, 1Ω, 250mA, SMD 0402; Manufacturer: TDK; Manufacturer Part Number: MMZ1005S102ET000; Package Size: 0402; JLCPCB Basic Part: No; JLCPCB Part Number: C275423; Supplier 1: LCSC; Category: Ferrite Beads; Supplier Part Number 1: C275423; Tolerance: ±25%; Rated Current: 250mA; DC Resistance: 1Ω; RoHS: Yes; ComponentLink1Description: Datasheet; ComponentLink1URL: https://wmsc.lcsc.com/wmsc/upload/file/pdf/v2/lcsc/2304140030_TDK-MMZ1005S102ET000_C275423.pdf; ComponentLink2Description: JLCPCB Part URL; ComponentLink2URL: https://jlcpcb.com/partdetail/C275423; ComponentLink3Description: LCSC Part URL; ComponentLink3URL: https://lcsc.com/product-detail/Ferrite-Beads_TDK-TDK-MMZ1005S102ET000_C275423.html
footprint FB-0402 (0402 (1005M) Ferrite)
pins: 1, 2

## MMZ1005S102HT000
designator FB?  Impedance @ Frequency: 1kΩ@100MHz
Ferrite, 1kΩ@100MHz, ±25%, 490mΩ, 360mA, SMD 0402; Manufacturer: TDK; Manufacturer Part Number: MMZ1005S102HT000; Package Size: 0402; JLCPCB Basic Part: No; JLCPCB Part Number: C193412; Supplier 1: LCSC; Category: Ferrite Beads; Supplier Part Number 1: C193412; Tolerance: ±25%; Rated Current: 360mA; DC Resistance: 490mΩ; RoHS: Yes; ComponentLink1Description: Datasheet; ComponentLink1URL: https://wmsc.lcsc.com/wmsc/upload/file/pdf/v2/lcsc/1810010153_TDK-MMZ1005S102HT000_C193412.pdf; ComponentLink2Description: JLCPCB Part URL; ComponentLink2URL: https://jlcpcb.com/partdetail/C193412; ComponentLink3Description: LCSC Part URL; ComponentLink3URL: https://lcsc.com/product-detail/Ferrite-Beads_TDK-TDK-MMZ1005S102HT000_C193412.html
footprint FB-0402 (0402 (1005M) Ferrite)
pins: 1, 2

## MMZ1005S121CT000
designator FB?  Impedance @ Frequency: 120Ω@100MHz
Ferrite, 120Ω@100MHz, ±25%, 220mΩ, 500mA, SMD 0402; Manufacturer: TDK; Manufacturer Part Number: MMZ1005S121CT000; Package Size: 0402; JLCPCB Basic Part: No; JLCPCB Part Number: C92036; Supplier 1: LCSC; Category: Ferrite Beads; Supplier Part Number 1: C92036; Tolerance: ±25%; Rated Current: 500mA; DC Resistance: 220mΩ; RoHS: Yes; ComponentLink1Description: Datasheet; ComponentLink1URL: https://wmsc.lcsc.com/wmsc/upload/file/pdf/v2/lcsc/2304140030_TDK-MMZ1005S121CT000_C92036.pdf; ComponentLink2Description: JLCPCB Part URL; ComponentLink2URL: https://jlcpcb.com/partdetail/C92036; ComponentLink3Description: LCSC Part URL; ComponentLink3URL: https://lcsc.com/product-detail/Ferrite-Beads_TDK-TDK-MMZ1005S121CT000_C92036.html
footprint FB-0402 (0402 (1005M) Ferrite)
pins: 1, 2

## MMZ1005S121CTD25
designator FB?  Impedance @ Frequency: 120Ω@100MHz
Ferrite, 120Ω@100MHz, ±25%, 220mΩ, 500mA, SMD 0402; Manufacturer: TDK; Manufacturer Part Number: MMZ1005S121CTD25; Package Size: 0402; JLCPCB Basic Part: No; JLCPCB Part Number: C404693; Supplier 1: LCSC; Category: Ferrite Beads; Supplier Part Number 1: C404693; Tolerance: ±25%; Rated Current: 500mA; DC Resistance: 220mΩ; RoHS: Yes; ComponentLink1Description: Datasheet; ComponentLink1URL: https://wmsc.lcsc.com/wmsc/upload/file/pdf/v2/lcsc/2304140030_TDK-MMZ1005S121CTD25_C404693.pdf; ComponentLink2Description: JLCPCB Part URL; ComponentLink2URL: https://jlcpcb.com/partdetail/C404693; ComponentLink3Description: LCSC Part URL; ComponentLink3URL: https://lcsc.com/product-detail/Ferrite-Beads_TDK-TDK-MMZ1005S121CTD25_C404693.html
footprint FB-0402 (0402 (1005M) Ferrite)
pins: 1, 2

## MMZ1005S182ET000
designator FB?  Impedance @ Frequency: 1.8kΩ@100MHz
Ferrite, 1.8kΩ@100MHz, ±25%, 1.5Ω, 200mA, SMD 0402; Manufacturer: TDK; Manufacturer Part Number: MMZ1005S182ET000; Package Size: 0402; JLCPCB Basic Part: No; JLCPCB Part Number: C694571; Supplier 1: LCSC; Category: Ferrite Beads; Supplier Part Number 1: C694571; Tolerance: ±25%; Rated Current: 200mA; DC Resistance: 1.5Ω; RoHS: Yes; ComponentLink1Description: Datasheet; ComponentLink1URL: https://wmsc.lcsc.com/wmsc/upload/file/pdf/v2/lcsc/2105241314_TDK-MMZ1005S182ET000_C694571.pdf; ComponentLink2Description: JLCPCB Part URL; ComponentLink2URL: https://jlcpcb.com/partdetail/C694571; ComponentLink3Description: LCSC Part URL; ComponentLink3URL: https://lcsc.com/product-detail/Ferrite-Beads_TDK-TDK-MMZ1005S182ET000_C694571.html
footprint FB-0402 (0402 (1005M) Ferrite)
pins: 1, 2

## MMZ1005S241AT000
designator FB?  Impedance @ Frequency: 240Ω@100MHz
Ferrite, 240Ω@100MHz, ±25%, 280mΩ, 400mA, SMD 0402; Manufacturer: TDK; Manufacturer Part Number: MMZ1005S241AT000; Package Size: 0402; JLCPCB Basic Part: No; JLCPCB Part Number: C87548; Supplier 1: LCSC; Category: Ferrite Beads; Supplier Part Number 1: C87548; Tolerance: ±25%; Rated Current: 400mA; DC Resistance: 280mΩ; RoHS: Yes; ComponentLink1Description: Datasheet; ComponentLink1URL: https://wmsc.lcsc.com/wmsc/upload/file/pdf/v2/lcsc/1810162217_TDK-MMZ1005S241AT000_C87548.pdf; ComponentLink2Description: JLCPCB Part URL; ComponentLink2URL: https://jlcpcb.com/partdetail/C87548; ComponentLink3Description: LCSC Part URL; ComponentLink3URL: https://lcsc.com/product-detail/Ferrite-Beads_TDK-TDK-MMZ1005S241AT000_C87548.html
footprint FB-0402 (0402 (1005M) Ferrite)
pins: 1, 2

## MMZ1005S241CT000
designator FB?  Impedance @ Frequency: 240Ω@100MHz
Ferrite, 240Ω@100MHz, ±25%, 280mΩ, 400mA, SMD 0402; Manufacturer: TDK; Manufacturer Part Number: MMZ1005S241CT000; Package Size: 0402; JLCPCB Basic Part: No; JLCPCB Part Number: C87549; Supplier 1: LCSC; Category: Ferrite Beads; Supplier Part Number 1: C87549; Tolerance: ±25%; Rated Current: 400mA; DC Resistance: 280mΩ; RoHS: Yes; ComponentLink1Description: Datasheet; ComponentLink1URL: https://wmsc.lcsc.com/wmsc/upload/file/pdf/v2/lcsc/2304140030_TDK-MMZ1005S241CT000_C87549.pdf; ComponentLink2Description: JLCPCB Part URL; ComponentLink2URL: https://jlcpcb.com/partdetail/C87549; ComponentLink3Description: LCSC Part URL; ComponentLink3URL: https://lcsc.com/product-detail/Ferrite-Beads_TDK-TDK-MMZ1005S241CT000_C87549.html
footprint FB-0402 (0402 (1005M) Ferrite)
pins: 1, 2

## MMZ1005S601CT000
designator FB?  Impedance @ Frequency: 600Ω@100MHz
Ferrite, 600Ω@100MHz, ±25%, 520mΩ, 300mA, SMD 0402; Manufacturer: TDK; Manufacturer Part Number: MMZ1005S601CT000; Package Size: 0402; JLCPCB Basic Part: No; JLCPCB Part Number: C76804; Supplier 1: LCSC; Category: Ferrite Beads; Supplier Part Number 1: C76804; Tolerance: ±25%; Rated Current: 300mA; DC Resistance: 520mΩ; RoHS: Yes; ComponentLink1Description: Datasheet; ComponentLink1URL: https://wmsc.lcsc.com/wmsc/upload/file/pdf/v2/lcsc/2304140030_TDK-MMZ1005S601CT000_C76804.pdf; ComponentLink2Description: JLCPCB Part URL; ComponentLink2URL: https://jlcpcb.com/partdetail/C76804; ComponentLink3Description: LCSC Part URL; ComponentLink3URL: https://lcsc.com/product-detail/Ferrite-Beads_TDK-TDK-MMZ1005S601CT000_C76804.html
footprint FB-0402 (0402 (1005M) Ferrite)
pins: 1, 2

## MMZ1005S601CTD25
designator FB?  Impedance @ Frequency: 600Ω@100MHz
Ferrite, 600Ω@100MHz, ±25%, 520mΩ, 300mA, SMD 0402; Manufacturer: TDK; Manufacturer Part Number: MMZ1005S601CTD25; Package Size: 0402; JLCPCB Basic Part: No; JLCPCB Part Number: C193388; Supplier 1: LCSC; Category: Ferrite Beads; Supplier Part Number 1: C193388; Tolerance: ±25%; Rated Current: 300mA; DC Resistance: 520mΩ; RoHS: Yes; ComponentLink1Description: Datasheet; ComponentLink1URL: https://wmsc.lcsc.com/wmsc/upload/file/pdf/v2/lcsc/2304140030_TDK-MMZ1005S601CTD25_C193388.pdf; ComponentLink2Description: JLCPCB Part URL; ComponentLink2URL: https://jlcpcb.com/partdetail/C193388; ComponentLink3Description: LCSC Part URL; ComponentLink3URL: https://lcsc.com/product-detail/Ferrite-Beads_TDK-TDK-MMZ1005S601CTD25_C193388.html
footprint FB-0402 (0402 (1005M) Ferrite)
pins: 1, 2

## MMZ1005S601ET000
designator FB?  Impedance @ Frequency: 600Ω@100MHz
Ferrite, 600Ω@100MHz, ±25%, 650mΩ, 300mA, SMD 0402; Manufacturer: TDK; Manufacturer Part Number: MMZ1005S601ET000; Package Size: 0402; JLCPCB Basic Part: No; JLCPCB Part Number: C87550; Supplier 1: LCSC; Category: Ferrite Beads; Supplier Part Number 1: C87550; Tolerance: ±25%; Rated Current: 300mA; DC Resistance: 650mΩ; RoHS: Yes; ComponentLink1Description: Datasheet; ComponentLink1URL: https://wmsc.lcsc.com/wmsc/upload/file/pdf/v2/lcsc/2304140030_TDK-MMZ1005S601ET000_C87550.pdf; ComponentLink2Description: JLCPCB Part URL; ComponentLink2URL: https://jlcpcb.com/partdetail/C87550; ComponentLink3Description: LCSC Part URL; ComponentLink3URL: https://lcsc.com/product-detail/Ferrite-Beads_TDK-TDK-MMZ1005S601ET000_C87550.html
footprint FB-0402 (0402 (1005M) Ferrite)
pins: 1, 2

## MMZ1005S601HT000
designator FB?  Impedance @ Frequency: 600Ω@100MHz
Ferrite, 600Ω@100MHz, ±25%, 340mΩ, 440mA, SMD 0402; Manufacturer: TDK; Manufacturer Part Number: MMZ1005S601HT000; Package Size: 0402; JLCPCB Basic Part: No; JLCPCB Part Number: C193387; Supplier 1: LCSC; Category: Ferrite Beads; Supplier Part Number 1: C193387; Tolerance: ±25%; Rated Current: 440mA; DC Resistance: 340mΩ; RoHS: Yes; ComponentLink1Description: Datasheet; ComponentLink1URL: https://wmsc.lcsc.com/wmsc/upload/file/pdf/v2/lcsc/2304140030_TDK-MMZ1005S601HT000_C193387.pdf; ComponentLink2Description: JLCPCB Part URL; ComponentLink2URL: https://jlcpcb.com/partdetail/C193387; ComponentLink3Description: LCSC Part URL; ComponentLink3URL: https://lcsc.com/product-detail/Ferrite-Beads_TDK-TDK-MMZ1005S601HT000_C193387.html
footprint FB-0402 (0402 (1005M) Ferrite)
pins: 1, 2

## MMZ1005S800CT000
designator FB?  Impedance @ Frequency: 80Ω@100MHz
Ferrite, 80Ω@100MHz, ±25%, 120mΩ, 500mA, SMD 0402; Manufacturer: TDK; Manufacturer Part Number: MMZ1005S800CT000; Package Size: 0402; JLCPCB Basic Part: No; JLCPCB Part Number: C76805; Supplier 1: LCSC; Category: Ferrite Beads; Supplier Part Number 1: C76805; Tolerance: ±25%; Rated Current: 500mA; DC Resistance: 120mΩ; RoHS: Yes; ComponentLink1Description: Datasheet; ComponentLink1URL: https://wmsc.lcsc.com/wmsc/upload/file/pdf/v2/lcsc/2304140030_TDK-MMZ1005S800CT000_C76805.pdf; ComponentLink2Description: JLCPCB Part URL; ComponentLink2URL: https://jlcpcb.com/partdetail/C76805; ComponentLink3Description: LCSC Part URL; ComponentLink3URL: https://lcsc.com/product-detail/Ferrite-Beads_TDK-TDK-MMZ1005S800CT000_C76805.html
footprint FB-0402 (0402 (1005M) Ferrite)
pins: 1, 2

## MMZ1005Y102CT000
designator FB?  Impedance @ Frequency: 1kΩ@100MHz
Ferrite, 1kΩ@100MHz, ±25%, 700mΩ, 200mA, SMD 0402; Manufacturer: TDK; Manufacturer Part Number: MMZ1005Y102CT000; Package Size: 0402; JLCPCB Basic Part: No; JLCPCB Part Number: C275428; Supplier 1: LCSC; Category: Ferrite Beads; Supplier Part Number 1: C275428; Tolerance: ±25%; Rated Current: 200mA; DC Resistance: 700mΩ; RoHS: Yes; ComponentLink1Description: Datasheet; ComponentLink1URL: https://wmsc.lcsc.com/wmsc/upload/file/pdf/v2/lcsc/2304140030_TDK-MMZ1005Y102CT000_C275428.pdf; ComponentLink2Description: JLCPCB Part URL; ComponentLink2URL: https://jlcpcb.com/partdetail/C275428; ComponentLink3Description: LCSC Part URL; ComponentLink3URL: https://lcsc.com/product-detail/Ferrite-Beads_TDK-TDK-MMZ1005Y102CT000_C275428.html
footprint FB-0402 (0402 (1005M) Ferrite)
pins: 1, 2

## MMZ1005Y102CTD25
designator FB?  Impedance @ Frequency: 1kΩ@100MHz
Ferrite, 1kΩ@100MHz, ±25%, 700mΩ, 200mA, SMD 0402; Manufacturer: TDK; Manufacturer Part Number: MMZ1005Y102CTD25; Package Size: 0402; JLCPCB Basic Part: No; JLCPCB Part Number: C404702; Supplier 1: LCSC; Category: Ferrite Beads; Supplier Part Number 1: C404702; Tolerance: ±25%; Rated Current: 200mA; DC Resistance: 700mΩ; RoHS: Yes; ComponentLink1Description: Datasheet; ComponentLink1URL: https://wmsc.lcsc.com/wmsc/upload/file/pdf/v2/lcsc/2304140030_TDK-MMZ1005Y102CTD25_C404702.pdf; ComponentLink2Description: JLCPCB Part URL; ComponentLink2URL: https://jlcpcb.com/partdetail/C404702; ComponentLink3Description: LCSC Part URL; ComponentLink3URL: https://lcsc.com/product-detail/Ferrite-Beads_TDK-TDK-MMZ1005Y102CTD25_C404702.html
footprint FB-0402 (0402 (1005M) Ferrite)
pins: 1, 2

## MMZ1005Y121CT000
designator FB?  Impedance @ Frequency: 120Ω@100MHz
Ferrite, 120Ω@100MHz, ±25%, 180mΩ, 400mA, SMD 0402; Manufacturer: TDK; Manufacturer Part Number: MMZ1005Y121CT000; Package Size: 0402; JLCPCB Basic Part: No; JLCPCB Part Number: C107324; Supplier 1: LCSC; Category: Ferrite Beads; Supplier Part Number 1: C107324; Tolerance: ±25%; Rated Current: 400mA; DC Resistance: 180mΩ; RoHS: Yes; ComponentLink1Description: Datasheet; ComponentLink1URL: https://wmsc.lcsc.com/wmsc/upload/file/pdf/v2/lcsc/1809051314_TDK-MMZ1005Y121CT000_C107324.pdf; ComponentLink2Description: JLCPCB Part URL; ComponentLink2URL: https://jlcpcb.com/partdetail/C107324; ComponentLink3Description: LCSC Part URL; ComponentLink3URL: https://lcsc.com/product-detail/Ferrite-Beads_TDK-TDK-MMZ1005Y121CT000_C107324.html
footprint FB-0402 (0402 (1005M) Ferrite)
pins: 1, 2

## MMZ1005Y121CTD25
designator FB?  Impedance @ Frequency: 120Ω@100MHz
Ferrite, 120Ω@100MHz, ±25%, 180mΩ, 400mA, SMD 0402; Manufacturer: TDK; Manufacturer Part Number: MMZ1005Y121CTD25; Package Size: 0402; JLCPCB Basic Part: No; JLCPCB Part Number: C404697; Supplier 1: LCSC; Category: Ferrite Beads; Supplier Part Number 1: C404697; Tolerance: ±25%; Rated Current: 400mA; DC Resistance: 180mΩ; RoHS: Yes; ComponentLink1Description: Datasheet; ComponentLink1URL: https://wmsc.lcsc.com/wmsc/upload/file/pdf/v2/lcsc/2304140030_TDK-MMZ1005Y121CTD25_C404697.pdf; ComponentLink2Description: JLCPCB Part URL; ComponentLink2URL: https://jlcpcb.com/partdetail/C404697; ComponentLink3Description: LCSC Part URL; ComponentLink3URL: https://lcsc.com/product-detail/Ferrite-Beads_TDK-TDK-MMZ1005Y121CTD25_C404697.html
footprint FB-0402 (0402 (1005M) Ferrite)
pins: 1, 2

## MMZ1005Y152CT000
designator FB?  Impedance @ Frequency: 1.5kΩ@100MHz
Ferrite, 1.5kΩ@100MHz, ±25%, 1Ω, 100mA, SMD 0402; Manufacturer: TDK; Manufacturer Part Number: MMZ1005Y152CT000; Package Size: 0402; JLCPCB Basic Part: No; JLCPCB Part Number: C275430; Supplier 1: LCSC; Category: Ferrite Beads; Supplier Part Number 1: C275430; Tolerance: ±25%; Rated Current: 100mA; DC Resistance: 1Ω; RoHS: Yes; ComponentLink1Description: Datasheet; ComponentLink1URL: https://wmsc.lcsc.com/wmsc/upload/file/pdf/v2/lcsc/1810140909_TDK-MMZ1005Y152CT000_C275430.pdf; ComponentLink2Description: JLCPCB Part URL; ComponentLink2URL: https://jlcpcb.com/partdetail/C275430; ComponentLink3Description: LCSC Part URL; ComponentLink3URL: https://lcsc.com/product-detail/Ferrite-Beads_TDK-TDK-MMZ1005Y152CT000_C275430.html
footprint FB-0402 (0402 (1005M) Ferrite)
pins: 1, 2

## MMZ1005Y182CT000
designator FB?  Impedance @ Frequency: 1.8kΩ@100MHz
Ferrite, 1.8kΩ@100MHz, ±25%, 850mΩ, 150mA, SMD 0402; Manufacturer: TDK; Manufacturer Part Number: MMZ1005Y182CT000; Package Size: 0402; JLCPCB Basic Part: No; JLCPCB Part Number: C2683172; Supplier 1: LCSC; Category: Ferrite Beads; Supplier Part Number 1: C2683172; Tolerance: ±25%; Rated Current: 150mA; DC Resistance: 850mΩ; RoHS: Yes; ComponentLink1Description: Datasheet; ComponentLink1URL: https://wmsc.lcsc.com/wmsc/upload/file/pdf/v2/lcsc/2106070404_TDK-MMZ1005Y182CT000_C2683172.pdf; ComponentLink2Description: JLCPCB Part URL; ComponentLink2URL: https://jlcpcb.com/partdetail/C2683172; ComponentLink3Description: LCSC Part URL; ComponentLink3URL: https://lcsc.com/product-detail/Ferrite-Beads_TDK-TDK-MMZ1005Y182CT000_C2683172.html
footprint FB-0402 (0402 (1005M) Ferrite)
pins: 1, 2

## MMZ1005Y241CTD25
designator FB?  Impedance @ Frequency: 240Ω@100MHz
Ferrite, 240Ω@100MHz, ±25%, 260mΩ, 300mA, SMD 0402; Manufacturer: TDK; Manufacturer Part Number: MMZ1005Y241CTD25; Package Size: 0402; JLCPCB Basic Part: No; JLCPCB Part Number: C404698; Supplier 1: LCSC; Category: Ferrite Beads; Supplier Part Number 1: C404698; Tolerance: ±25%; Rated Current: 300mA; DC Resistance: 260mΩ; RoHS: Yes; ComponentLink1Description: Datasheet; ComponentLink1URL: https://wmsc.lcsc.com/wmsc/upload/file/pdf/v2/lcsc/2304140030_TDK-MMZ1005Y241CTD25_C404698.pdf; ComponentLink2Description: JLCPCB Part URL; ComponentLink2URL: https://jlcpcb.com/partdetail/C404698; ComponentLink3Description: LCSC Part URL; ComponentLink3URL: https://lcsc.com/product-detail/Ferrite-Beads_TDK-TDK-MMZ1005Y241CTD25_C404698.html
footprint FB-0402 (0402 (1005M) Ferrite)
pins: 1, 2

## MMZ1005Y301CT000
designator FB?  Impedance @ Frequency: 300Ω@100MHz
Ferrite, 300Ω@100MHz, ±25%, 380mΩ, 250mA, SMD 0402; Manufacturer: TDK; Manufacturer Part Number: MMZ1005Y301CT000; Package Size: 0402; JLCPCB Basic Part: No; JLCPCB Part Number: C275431; Supplier 1: LCSC; Category: Ferrite Beads; Supplier Part Number 1: C275431; Tolerance: ±25%; Rated Current: 250mA; DC Resistance: 380mΩ; RoHS: Yes; ComponentLink1Description: Datasheet; ComponentLink1URL: https://wmsc.lcsc.com/wmsc/upload/file/pdf/v2/lcsc/2304140030_TDK-MMZ1005Y301CT000_C275431.pdf; ComponentLink2Description: JLCPCB Part URL; ComponentLink2URL: https://jlcpcb.com/partdetail/C275431; ComponentLink3Description: LCSC Part URL; ComponentLink3URL: https://lcsc.com/product-detail/Ferrite-Beads_TDK-TDK-MMZ1005Y301CT000_C275431.html
footprint FB-0402 (0402 (1005M) Ferrite)
pins: 1, 2

## MMZ1005Y400CT000
designator FB?  Impedance @ Frequency: 40Ω@100MHz
Ferrite, 40Ω@100MHz, ±25%, 100mΩ, 550mA, SMD 0402; Manufacturer: TDK; Manufacturer Part Number: MMZ1005Y400CT000; Package Size: 0402; JLCPCB Basic Part: No; JLCPCB Part Number: C76807; Supplier 1: LCSC; Category: Ferrite Beads; Supplier Part Number 1: C76807; Tolerance: ±25%; Rated Current: 550mA; DC Resistance: 100mΩ; RoHS: Yes; ComponentLink1Description: Datasheet; ComponentLink1URL: https://wmsc.lcsc.com/wmsc/upload/file/pdf/v2/lcsc/2304140030_TDK-MMZ1005Y400CT000_C76807.pdf; ComponentLink2Description: JLCPCB Part URL; ComponentLink2URL: https://jlcpcb.com/partdetail/C76807; ComponentLink3Description: LCSC Part URL; ComponentLink3URL: https://lcsc.com/product-detail/Ferrite-Beads_TDK-TDK-MMZ1005Y400CT000_C76807.html
footprint FB-0402 (0402 (1005M) Ferrite)
pins: 1, 2

## MMZ1005Y471CT000
designator FB?  Impedance @ Frequency: 470Ω@100MHz
Ferrite, 470Ω@100MHz, ±25%, 470mΩ, 250mA, SMD 0402; Manufacturer: TDK; Manufacturer Part Number: MMZ1005Y471CT000; Package Size: 0402; JLCPCB Basic Part: No; JLCPCB Part Number: C87551; Supplier 1: LCSC; Category: Ferrite Beads; Supplier Part Number 1: C87551; Tolerance: ±25%; Rated Current: 250mA; DC Resistance: 470mΩ; RoHS: Yes; ComponentLink1Description: Datasheet; ComponentLink1URL: https://wmsc.lcsc.com/wmsc/upload/file/pdf/v2/lcsc/2304140030_TDK-MMZ1005Y471CT000_C87551.pdf; ComponentLink2Description: JLCPCB Part URL; ComponentLink2URL: https://jlcpcb.com/partdetail/C87551; ComponentLink3Description: LCSC Part URL; ComponentLink3URL: https://lcsc.com/product-detail/Ferrite-Beads_TDK-TDK-MMZ1005Y471CT000_C87551.html
footprint FB-0402 (0402 (1005M) Ferrite)
pins: 1, 2